# Altium schematic symbol library TIE_2019.SchLib: 21 symbols
Pins are listed as number, name and electrical type; pins without a type are passive.

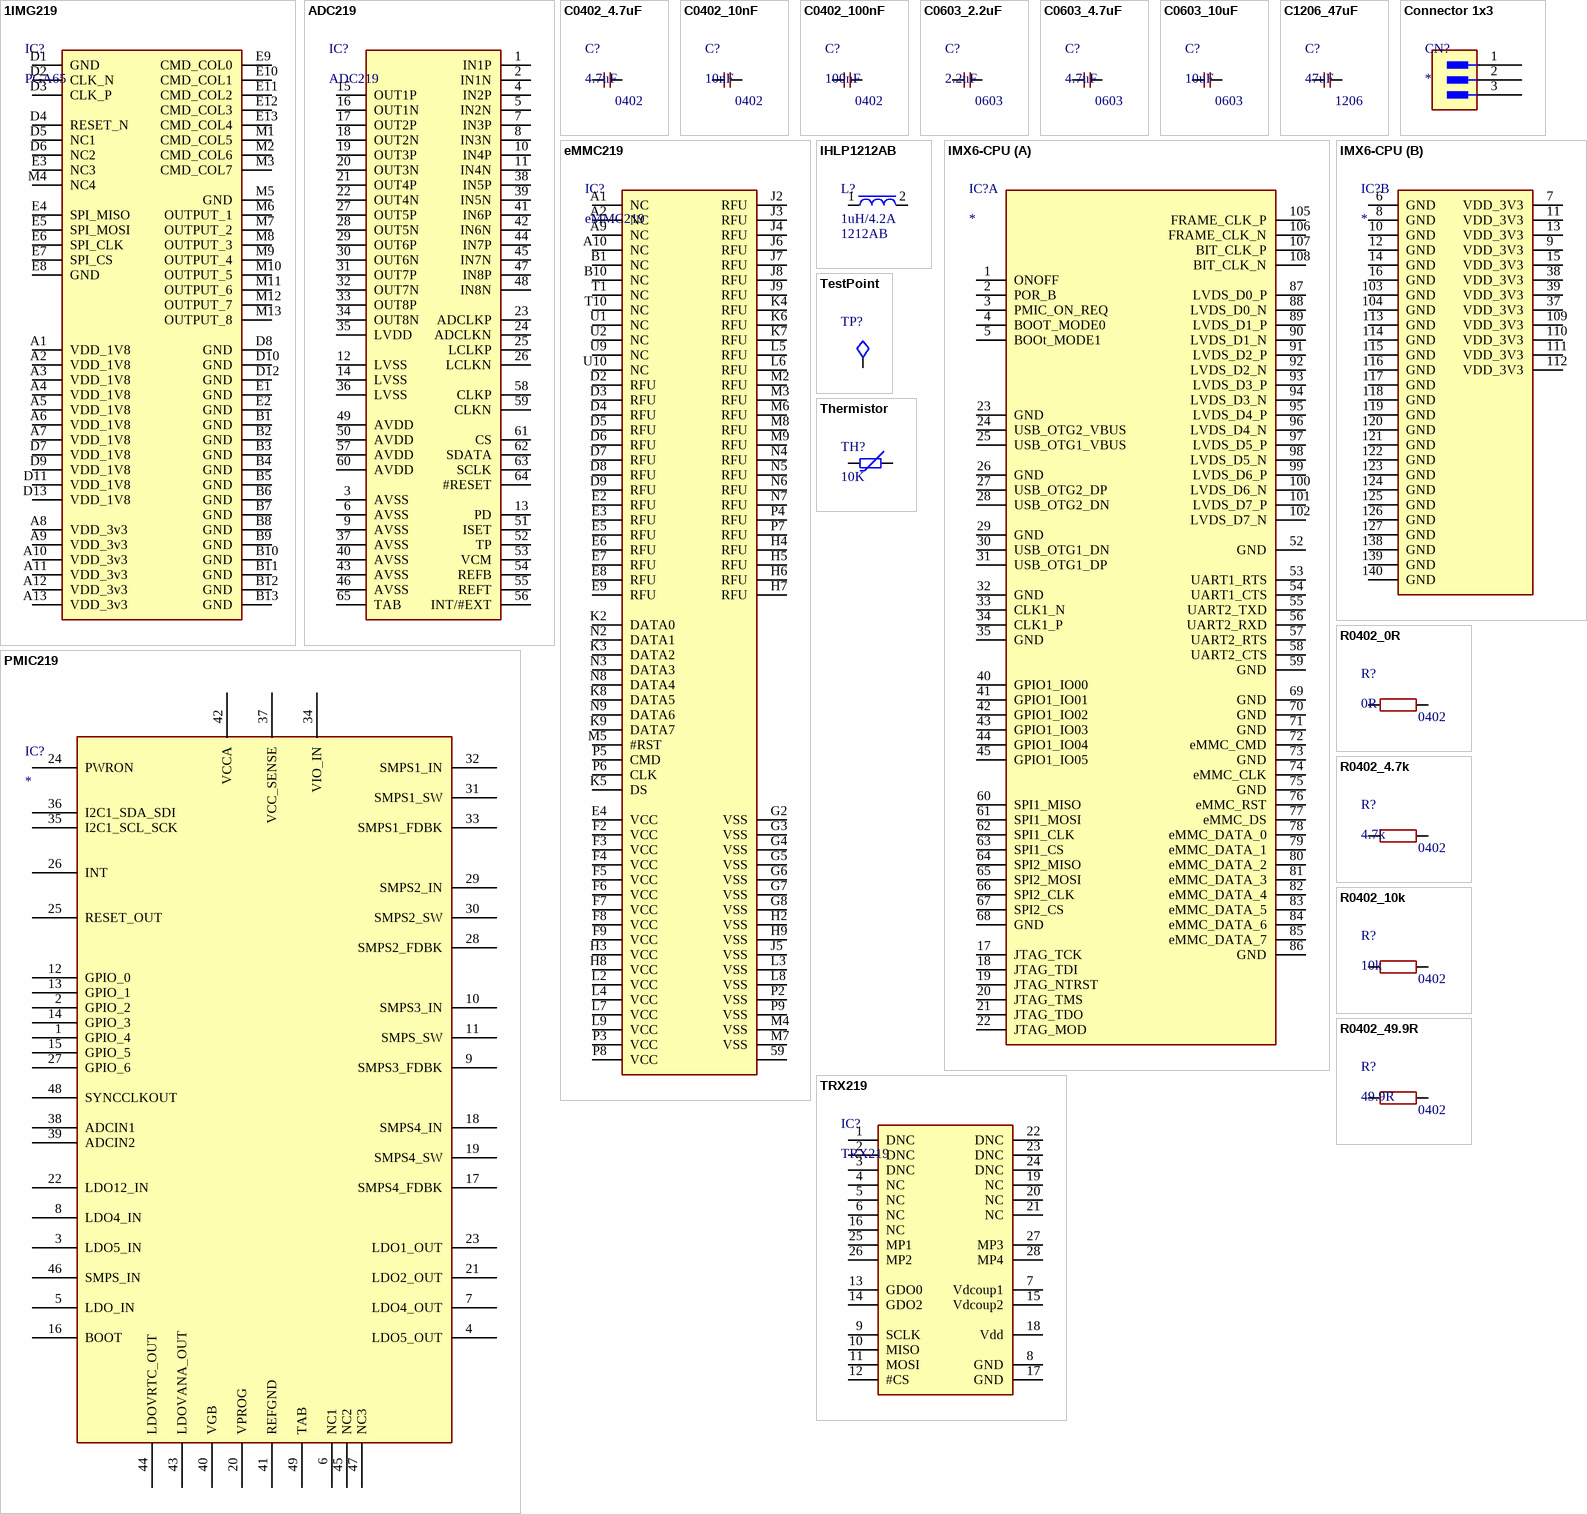
[diagram p0: symbols 1IMG219 to TRX219]

## 1IMG219
designator IC?, comment PGA65
footprint PGAx13
pins: A1 VDD_1V8, A2 VDD_1V8, A3 VDD_1V8, A4 VDD_1V8, A5 VDD_1V8, A6 VDD_1V8, A7 VDD_1V8, A8 VDD_3v3, A9 VDD_3v3, A10 VDD_3v3, A11 VDD_3v3, A12 VDD_3v3, A13 VDD_3v3, B1 GND, B2 GND, B3 GND, B4 GND, B5 GND, B6 GND, B7 GND, B8 GND, B9 GND, B10 GND, B11 GND, B12 GND, B13 GND, D1 GND, D2 CLK_N, D3 CLK_P, D4 RESET_N, D5 NC1, D6 NC2, D7 VDD_1V8, D8 GND, D9 VDD_1V8, D10 GND, D11 VDD_1V8, D12 GND, D13 VDD_1V8, E1 GND, E2 GND, E3 NC3, E4 SPI_MISO, E5 SPI_MOSI, E6 SPI_CLK, E7 SPI_CS, E8 GND, E9 CMD_COL0, E10 CMD_COL1, E11 CMD_COL2, E12 CMD_COL3, E13 CMD_COL4, M1 CMD_COL5, M2 CMD_COL6, M3 CMD_COL7, M4 NC4, M5 GND, M6 OUTPUT_1, M7 OUTPUT_2, M8 OUTPUT_3, M9 OUTPUT_4, M10 OUTPUT_5, M11 OUTPUT_6, M12 OUTPUT_7, M13 OUTPUT_8

## ADC219
designator IC?
footprint QFN64 (QFN, 64-Leads, Body 9.00x9.00mm, Pitch 0.50mm, Thermal Pad 7.25x7.25mm, IPC Medium Density)
pins: 1 IN1P, 2 IN1N, 3 AVSS, 4 IN2P, 5 IN2N, 6 AVSS, 7 IN3P, 8 IN3N, 9 AVSS, 10 IN4P, 11 IN4N, 12 LVSS, 13 PD, 14 LVSS, 15 OUT1P, 16 OUT1N, 17 OUT2P, 18 OUT2N, 19 OUT3P, 20 OUT3N, 21 OUT4P, 22 OUT4N, 23 ADCLKP, 24 ADCLKN, 25 LCLKP, 26 LCLKN, 27 OUT5P, 28 OUT5N, 29 OUT6P, 30 OUT6N, 31 OUT7P, 32 OUT7N, 33 OUT8P, 34 OUT8N, 35 LVDD, 36 LVSS, 37 AVSS, 38 IN5P, 39 IN5N, 40 AVSS, 41 IN6P, 42 IN6N, 43 AVSS, 44 IN7P, 45 IN7N, 46 AVSS, 47 IN8P, 48 IN8N, 49 AVDD, 50 AVDD, 51 ISET, 52 TP, 53 VCM, 54 REFB, 55 REFT, 56 INT/#EXT, 57 AVDD, 58 CLKP, 59 CLKN, 60 AVDD, 61 CS, 62 SDATA, 63 SCLK, 64 #RESET, 65 TAB

## C0402_4.7uF
designator C?, comment 4.7uF  Footprint Name: 0402
CAP CER 4.7upF SMD 0402; Manufacturer: Murata; Manufacturer Part Number: GJM1555C1H100JB01D; Parameter 1: 50V
footprint CAP0402
pins: 1, 2

## C0402_10nF
designator C?, comment 10nF  Footprint Name: 0402
CAP CER 10nF SMD 0402; Manufacturer: Murata; Manufacturer Part Number: GJM1555C1H100JB01D; Parameter 1: 50V
footprint CAP0402
pins: 1, 2

## C0402_100nF
designator C?, comment 100nF  Footprint Name: 0402
CAP CER 100nF SMD 0402; Manufacturer: Murata; Manufacturer Part Number: GJM1555C1H100JB01D; Parameter 1: 50V
footprint CAP0402
pins: 1, 2

## C0603_2.2uF
designator C?, comment 2.2uF  Footprint Name: 0603
CAP CER 2.2uF  SMD 0603; Manufacturer: Murata; Manufacturer Part Number: GJM1555C1H100JB01D
footprint CAP0603
pins: 1, 2

## C0603_4.7uF
designator C?, comment 4.7uF  Footprint Name: 0603
CAP CER 4.7uF  SMD 0603; Manufacturer: Murata; Manufacturer Part Number: GJM1555C1H100JB01D
footprint CAP0603
pins: 1, 2

## C0603_10uF
designator C?, comment 10uF  Footprint Name: 0603
CAP CER 10uF  SMD 0603; Manufacturer: Murata; Manufacturer Part Number: GJM1555C1H100JB01D
footprint CAP0603
pins: 1, 2

## C1206_47uF
designator C?, comment 47uF  Footprint Name: 1206
CAP CER 47uF  SMD 1206; Manufacturer: Murata; Manufacturer Part Number: GJM1555C1H100JB01D
footprint CAP1206
pins: 1, 2

## Connector 1x3
designator CN?
footprint Conn1x03
pins: 1, 2, 3

## eMMC219
designator IC?
BGA100
footprint BGA100 (BGA, 100-Leads, Body 14.00x18.00mmx1.40mm, Pitch 1.00mm)
pins: 59, A1 NC, A2 NC, A9 NC, A10 NC, B1 NC, B10 NC, D2 RFU, D3 RFU, D4 RFU, D5 RFU, D6 RFU, D7 RFU, D8 RFU, D9 RFU, E2 RFU, E3 RFU, E4 VCC, E5 RFU, E6 RFU, E7 RFU, E8 RFU, E9 RFU, F2 VCC, F3 VCC, F4 VCC, F5 VCC, F6 VCC, F7 VCC, F8 VCC, F9 VCC, G2 VSS, G3 VSS, G4 VSS, G5 VSS, G6 VSS, G7 VSS, G8 VSS, H2 VSS, H3 VCC, H4 RFU, H5 RFU, H6 RFU, H7 RFU, H8 VCC, H9 VSS, J2 RFU, J3 RFU, J4 RFU, J5 VSS, J6 RFU, J7 RFU, J8 RFU, J9 RFU, K2 DATA0, K3 DATA2, K4 RFU, K5 DS, K6 RFU, K7 RFU, K8 DATA5, K9 DATA7, L2 VCC, L3 VSS, L4 VCC, L5 RFU, L6 RFU, L7 VCC, L8 VSS, L9 VCC, M2 RFU, M3 RFU, M4 VSS, M5 #RST, M6 RFU, M7 VSS, M8 RFU, M9 RFU, N2 DATA1, N3 DATA3, N4 RFU, N5 RFU, N6 RFU, N7 RFU, N8 DATA4, N9 DATA6, P2 VSS, P3 VCC, P4 RFU, P5 CMD, P6 CLK, P7 RFU, P8 VCC, P9 VSS, T1 NC, T10 NC, U1 NC, U2 NC, U9 NC, U10 NC

## IHLP1212AB
designator L?, comment 1uH/4.2A  Footprint: 1212AB
footprint L_1212AB
pins: 1, 2

## IMX6-CPU
designator IC?
528MHz NXP i.MX 6UL/6ULL ARM Cortex-A7 Processors
footprint IMX6-SoM
part A pins: 1 ONOFF, 2 POR_B, 3 PMIC_ON_REQ, 4 BOOT_MODE0, 5 BOOt_MODE1, 17 JTAG_TCK, 18 JTAG_TDI, 19 JTAG_NTRST, 20 JTAG_TMS, 21 JTAG_TDO, 22 JTAG_MOD, 23 GND, 24 USB_OTG2_VBUS, 25 USB_OTG1_VBUS, 26 GND, 27 USB_OTG2_DP, 28 USB_OTG2_DN, 29 GND, 30 USB_OTG1_DN, 31 USB_OTG1_DP, 32 GND, 33 CLK1_N, 34 CLK1_P, 35 GND, 40 GPIO1_IO00, 41 GPIO1_IO01, 42 GPIO1_IO02, 43 GPIO1_IO03, 44 GPIO1_IO04, 45 GPIO1_IO05, 52 GND, 53 UART1_RTS, 54 UART1_CTS, 55 UART2_TXD, 56 UART2_RXD, 57 UART2_RTS, 58 UART2_CTS, 59 GND, 60 SPI1_MISO, 61 SPI1_MOSI, 62 SPI1_CLK, 63 SPI1_CS, 64 SPI2_MISO, 65 SPI2_MOSI, 66 SPI2_CLK, 67 SPI2_CS, 68 GND, 69 GND, 70 GND, 71 GND, 72 eMMC_CMD, 73 GND, 74 eMMC_CLK, 75 GND, 76 eMMC_RST, 77 eMMC_DS, 78 eMMC_DATA_0, 79 eMMC_DATA_1, 80 eMMC_DATA_2, 81 eMMC_DATA_3, 82 eMMC_DATA_4, 83 eMMC_DATA_5, 84 eMMC_DATA_6, 85 eMMC_DATA_7, 86 GND, 87 LVDS_D0_P, 88 LVDS_D0_N, 89 LVDS_D1_P, 90 LVDS_D1_N, 91 LVDS_D2_P, 92 LVDS_D2_N, 93 LVDS_D3_P, 94 LVDS_D3_N, 95 LVDS_D4_P, 96 LVDS_D4_N, 97 LVDS_D5_P, 98 LVDS_D5_N, 99 LVDS_D6_P, 100 LVDS_D6_N, 101 LVDS_D7_P, 102 LVDS_D7_N, 105 FRAME_CLK_P, 106 FRAME_CLK_N, 107 BIT_CLK_P, 108 BIT_CLK_N
part B pins: 6 GND, 7 VDD_3V3, 8 GND, 9 VDD_3V3, 10 GND, 11 VDD_3V3, 12 GND, 13 VDD_3V3, 14 GND, 15 VDD_3V3, 16 GND, 37 VDD_3V3, 38 VDD_3V3, 39 VDD_3V3, 103 GND, 104 GND, 109 VDD_3V3, 110 VDD_3V3, 111 VDD_3V3, 112 VDD_3V3, 113 GND, 114 GND, 115 GND, 116 GND, 117 GND, 118 GND, 119 GND, 120 GND, 121 GND, 122 GND, 123 GND, 124 GND, 125 GND, 126 GND, 127 GND, 138 GND, 139 GND, 140 GND

## PMIC219
designator IC?
footprint 48-QFN (6x6mm QFN Package)
pins: 1 GPIO_4, 2 GPIO_2, 3 LDO5_IN, 4 LDO5_OUT, 5 LDO_IN, 6 NC1, 7 LDO4_OUT, 8 LDO4_IN, 9 SMPS3_FDBK, 10 SMPS3_IN, 11 SMPS_SW, 12 GPIO_0, 13 GPIO_1, 14 GPIO_3, 15 GPIO_5, 16 BOOT, 17 SMPS4_FDBK, 18 SMPS4_IN, 19 SMPS4_SW, 20 VPROG, 21 LDO2_OUT, 22 LDO12_IN, 23 LDO1_OUT, 24 PWRON, 25 RESET_OUT, 26 INT, 27 GPIO_6, 28 SMPS2_FDBK, 29 SMPS2_IN, 30 SMPS2_SW, 31 SMPS1_SW, 32 SMPS1_IN, 33 SMPS1_FDBK, 34 VIO_IN, 35 I2C1_SCL_SCK, 36 I2C1_SDA_SDI, 37 VCC_SENSE, 38 ADCIN1, 39 ADCIN2, 40 VGB, 41 REFGND, 42 VCCA, 43 LDOVANA_OUT, 44 LDOVRTC_OUT, 45 NC2, 46 SMPS_IN, 47 NC3, 48 SYNCCLKOUT, 49 TAB

## R0402_0R
designator R?, comment 0R  Footprint Name: 0402
RES TKF 0R  SMD 0402; Manufacturer: TE Connectivity; Manufacturer Part Number: CRG0402F10K; Tolerance: 1%
footprint RES0402
pins: 1, 2

## R0402_4.7k
designator R?, comment 4.7k  Footprint Name: 0402
RES TKF 4.7k SMD 0402; Manufacturer: TE Connectivity; Manufacturer Part Number: CRG0402F10K; Tolerance: 1%
footprint RES0402
pins: 1, 2

## R0402_10k
designator R?, comment 10k  Footprint Name: 0402
RES TKF 10k  SMD 0402; Manufacturer: TE Connectivity; Manufacturer Part Number: CRG0402F10K; Tolerance: 1%
footprint RES0402
pins: 1, 2

## R0402_49.9R
designator R?, comment 49.9R  Footprint Name: 0402
RES TKF 49.9R SMD 0402; Manufacturer: TE Connectivity; Manufacturer Part Number: CRG0402F10K; Tolerance: 1%
footprint RES0402
pins: 1, 2

## TestPoint
designator TP?  (value not drawn)  (no BOM)
SMD test point; Manufacturer: NA; .Checked_PCB: AI; .Creator: RV; .Checked_SCH: AI; Manufacturer Part Number: NA
footprint TestPoint_2019
pins: 1

## Thermistor
designator TH?, comment 10K
THERMISTOR 10K OHM  0402
footprint RES0402
pins: 1, 2

## TRX219
designator IC?
MOD26
footprint A1101R09C00GM (Sub-GHz Modules 900MHz Radio Only Connector)
pins: 1 DNC, 2 DNC, 3 DNC, 4 NC, 5 NC, 6 NC, 7 Vdcoup1, 8 GND, 9 SCLK, 10 MISO, 11 MOSI, 12 #CS, 13 GDO0, 14 GDO2, 15 Vdcoup2, 16 NC, 17 GND, 18 Vdd, 19 NC, 20 NC, 21 NC, 22 DNC, 23 DNC, 24 DNC, 25 MP1, 26 MP2, 27 MP3, 28 MP4